# Altium footprint library SamacSys.PcbLib: 1008 footprints (part 55 of 63)
Each footprint in its own frame and in the unit in brackets; x right, y up, seen from the top. Pads: shape width x height; smd on the part's side, far side on the other; paste and mask are expansions set on the pad; w line width, h text height; cw(c..) or ccw(c..) is an arc to the next point about the centre after c.
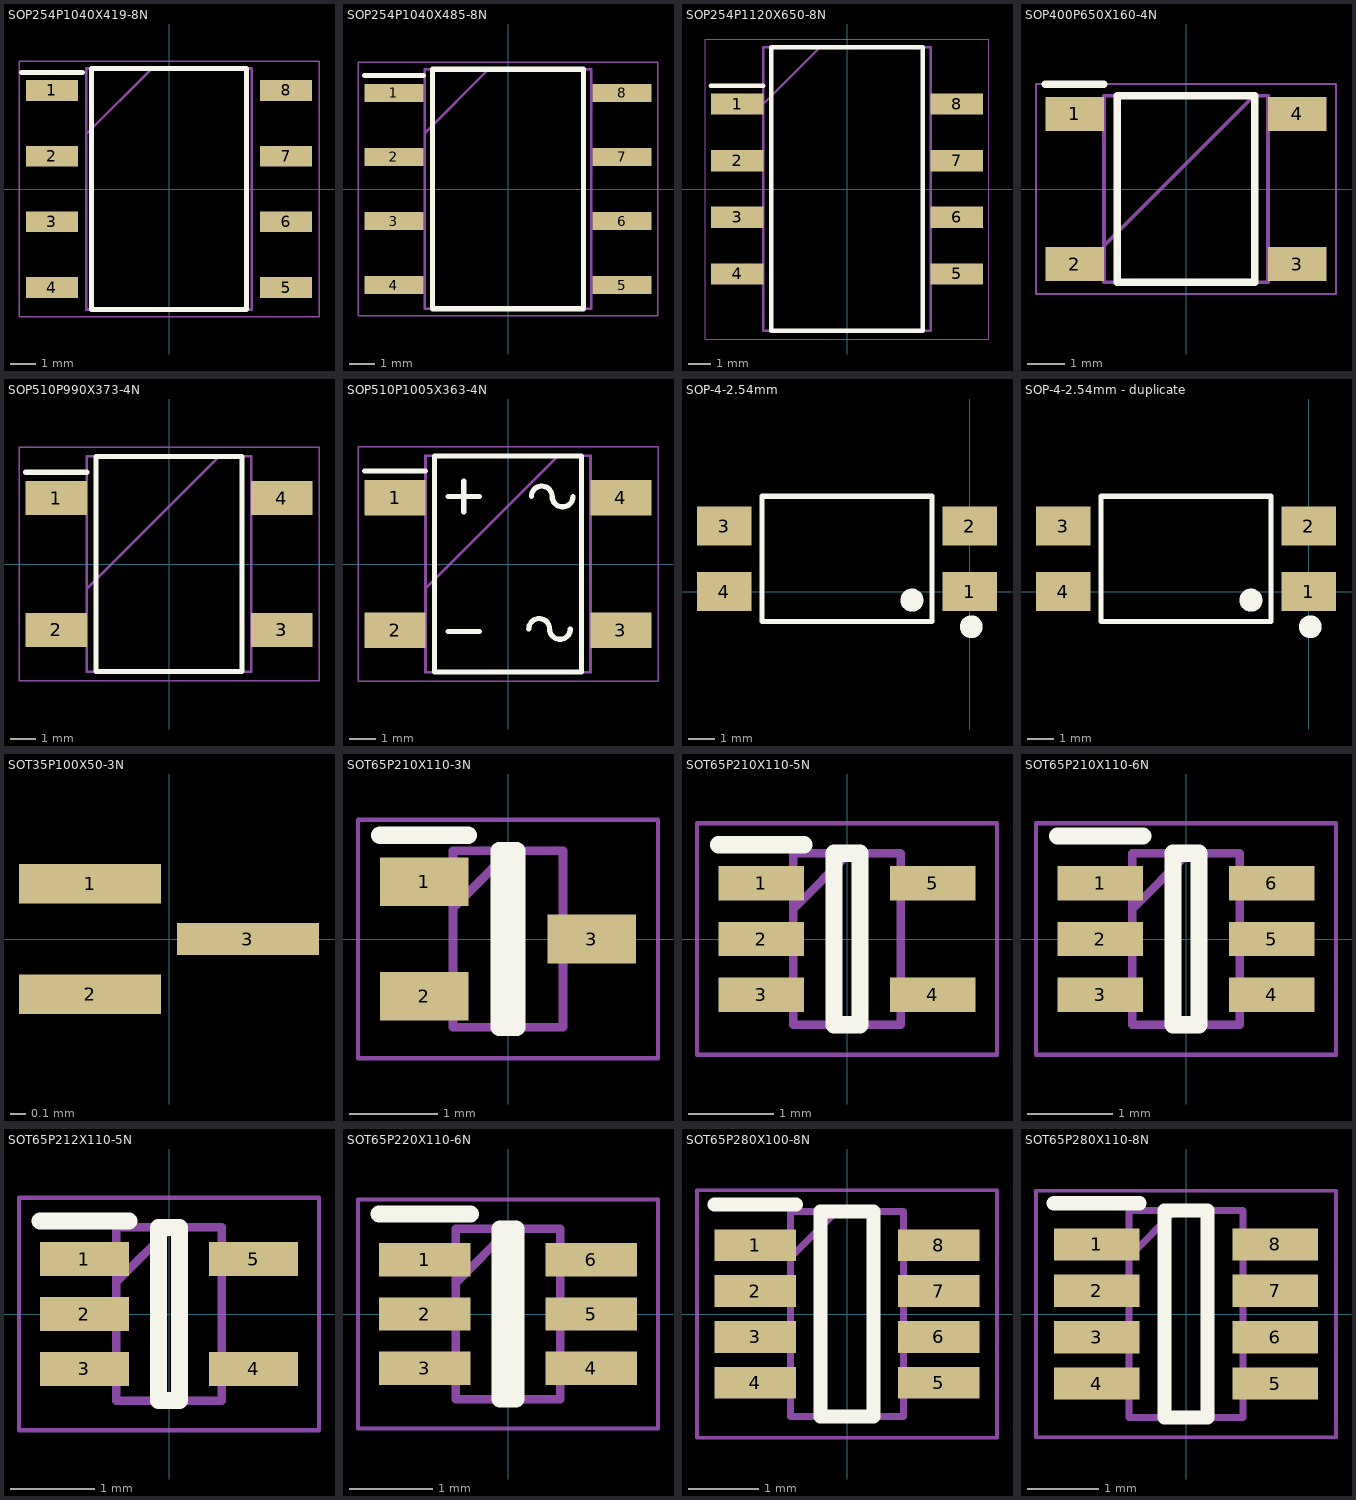
[diagram p54: the footprints below, top view; thin cyan lines are the x and y axes]

## SOP254P1040X419-8N [mm]
pads (8):
  rect 2x0.8 smd: 1(-4.525,3.81) 2(-4.525,1.27) 3(-4.525,-1.27) 4(-4.525,-3.81) 5(4.525,-3.81) 6(4.525,-1.27) 7(4.525,1.27) 8(4.525,3.81)
Top Overlay:
  lines w0.2: -5.7,4.51 -3.35,4.51 ; -3,-4.66 -3,4.66 3,4.66 3,-4.66 -3,-4.66
Assembly:
  lines w0.1: -3.2,2.12 -0.66,4.66 ; -3.2,-4.66 -3.2,4.66 3.2,4.66 3.2,-4.66 -3.2,-4.66
Countryard:
  lines w0.05: -5.8,-4.935 -5.8,4.935 5.8,4.935 5.8,-4.935 -5.8,-4.935
3D body "NSi1050-DDBR.stp": height 4.19, standoff 0, extent -5.2,-4.66 5.2,4.66

## SOP254P1040X485-8N [mm]
pads (8):
  rect 2.35x0.7 smd: 1(-4.525,3.81) 2(-4.525,1.27) 3(-4.525,-1.27) 4(-4.525,-3.81) 5(4.525,-3.81) 6(4.525,-1.27) 7(4.525,1.27) 8(4.525,3.81)
Top Overlay:
  lines w0.2: -5.7,4.51 -3.35,4.51 ; -3,-4.75 -3,4.75 3,4.75 3,-4.75 -3,-4.75
Assembly:
  lines w0.1: -3.31,2.21 -0.77,4.75 ; -3.31,-4.75 -3.31,4.75 3.31,4.75 3.31,-4.75 -3.31,-4.75
Countryard:
  lines w0.05: -5.95,-5.025 -5.95,5.025 5.95,5.025 5.95,-5.025 -5.95,-5.025
3D body "ISO1050DUB.stp": height 3.68, standoff 0, extent -5.21,-4.575 5.21,4.575

## SOP254P1120X650-8N [mm]
pads (8):
  rect 2.35x0.95 smd: 1(-4.925,3.81) 2(-4.925,1.27) 3(-4.925,-1.27) 4(-4.925,-3.81) 5(4.925,-3.81) 6(4.925,-1.27) 7(4.925,1.27) 8(4.925,3.81)
Top Overlay:
  lines w0.2: -6.1,4.635 -3.75,4.635 ; -3.4,-6.35 3.4,-6.35 3.4,6.35 -3.4,6.35 -3.4,-6.35
Assembly:
  lines w0.1: -3.75,3.81 -1.21,6.35 ; -3.75,-6.35 3.75,-6.35 3.75,6.35 -3.75,6.35 -3.75,-6.35
Countryard:
  lines w0.05: -6.35,-6.725 6.35,-6.725 6.35,6.725 -6.35,6.725 -6.35,-6.725
3D body "AM1L-0505S-NZ.stp": height 6.5, standoff 0, extent -5.6,-6.35 5.6,6.35

## SOP400P650X160-4N [mm]
pads (4):
  rect 1.562x0.9 smd: 1(-2.969,2) 2(-2.969,-2) 3(2.969,-2) 4(2.969,2)
Top Overlay:
  lines w0.2: -3.75,2.8 -2.188,2.8 ; -1.838,-2.488 1.838,-2.488 1.838,2.488 -1.838,2.488 -1.838,-2.488
Assembly:
  lines w0.1: -2.188,-1.512 1.812,2.488 ; -2.188,-2.488 2.188,-2.488 2.188,2.488 -2.188,2.488 -2.188,-2.488
Countryard:
  lines w0.05: -4,-2.8 4,-2.8 4,2.8 -4,2.8 -4,-2.8
3D body "MDB10SV.stp": height 1.6, standoff 0, extent -3.25,-2.488 3.25,2.488

## SOP510P990X373-4N [mm]
pads (4):
  rect 2.375x1.3 smd: 1(-4.362,2.55) 2(-4.362,-2.55) 3(4.362,-2.55) 4(4.362,2.55)
Top Overlay:
  lines w0.2: -5.55,3.55 -3.175,3.55 ; -2.825,-4.16 2.825,-4.16 2.825,4.16 -2.825,4.16 -2.825,-4.16
Assembly:
  lines w0.1: -3.175,-0.94 1.925,4.16 ; -3.175,-4.16 3.175,-4.16 3.175,4.16 -3.175,4.16 -3.175,-4.16
Countryard:
  lines w0.05: -5.8,-4.505 5.8,-4.505 5.8,4.505 -5.8,4.505 -5.8,-4.505
3D body "DB157S.stp": height 3.73, standoff 0, extent -4.95,-4.16 4.95,4.16

## SOP510P1005X363-4N [mm]
pads (4):
  rect 2.35x1.35 smd: 1(-4.35,2.55) 2(-4.35,-2.55) 3(4.35,-2.55) 4(4.35,2.55)
Top Overlay:
  lines w0.2: -5.525,3.575 -3.175,3.575 ; -2.3,-2.6 -1.1,-2.6 ; -2.3,2.6 -1.1,2.6 ; -1.7,2 -1.7,3.2 ; 0.8,-2.5 cw(c1.2,-2.5) 1.6,-2.5 ccw(c2,-2.5) 2.4,-2.5 ; 0.9,2.6 cw(c1.3,2.6) 1.7,2.6 ccw(c2.1,2.6) 2.5,2.6 ; -2.825,-4.16 2.825,-4.16 2.825,4.16 -2.825,4.16 -2.825,-4.16
Assembly:
  lines w0.1: -3.175,-0.94 1.925,4.16 ; -3.175,-4.16 3.175,-4.16 3.175,4.16 -3.175,4.16 -3.175,-4.16
Countryard:
  lines w0.05: -5.775,-4.505 5.775,-4.505 5.775,4.505 -5.775,4.505 -5.775,-4.505
3D body "DF01SA-E3_45.stp": height 3.63, standoff 0, extent -5.025,-4.16 5.025,4.16

## SOP-4-2.54mm [mm]
pads (4):
  rect 2.1x1.5 smd: 1(0,0) 2(0,2.525) 3(-9.45,2.525) 4(-9.45,0)
Top Overlay:
  circle w0.5: c0.06,-1.35 r0.19
  circle w0.5: c-2.225,-0.325 r0.195
  lines w0.2: -8,0.925 -8,3.675 -1.45,3.675 -1.45,-1.15 -8,-1.15 -8,1.075

## SOP-4-2.54mm - duplicate [mm]
pads (4):
  rect 2.1x1.5 smd: 1(0,0) 2(0,2.525) 3(-9.45,2.525) 4(-9.45,0)
Top Overlay:
  circle w0.5: c-2.225,-0.325 r0.195
  circle w0.5: c0.06,-1.35 r0.19
  lines w0.2: -8,0.925 -8,3.675 -1.45,3.675 -1.45,-1.15 -8,-1.15 -8,1.075

## SOT35P100X50-3N [mil]
pads (3):
  rect 36x10 smd: 1(-20,14) 2(-20,-14)
  rect 36x8 smd: 3(20,0)
3D body "TPD2EUSB30ADRTR.stp": height 19.49, standoff 0, extent -19.68,-19.68 19.68,19.68

## SOT65P210X110-3N [mm]
pads (3):
  rect 1x0.55 smd: 1(-0.95,0.65) 2(-0.95,-0.65) 3(0.95,0)
Top Overlay:
  lines w0.2: -1.45,1.175 -0.45,1.175 ; -0.1,-1 0.1,-1 0.1,1 -0.1,1 -0.1,-1
Assembly:
  lines w0.1: -0.625,0.35 0.025,1 ; -0.625,-1 0.625,-1 0.625,1 -0.625,1 -0.625,-1
Countryard:
  lines w0.05: -1.7,-1.35 1.7,-1.35 1.7,1.35 -1.7,1.35 -1.7,-1.35
3D body "BAS40W.stp": height 0.95, standoff 0, extent -1.052,-1.049 1.048,1.051

## SOT65P210X110-5N [mm]
pads (5):
  rect 1x0.4 smd: 1(-1,0.65) 2(-1,0) 3(-1,-0.65) 4(1,-0.65) 5(1,0.65)
Top Overlay:
  lines w0.2: -1.5,1.1 -0.5,1.1 ; -0.15,-1 -0.15,1 0.15,1 0.15,-1 -0.15,-1
Assembly:
  lines w0.1: -0.625,0.35 0.025,1 ; -0.625,-1 -0.625,1 0.625,1 0.625,-1 -0.625,-1
Countryard:
  lines w0.05: -1.75,-1.35 -1.75,1.35 1.75,1.35 1.75,-1.35 -1.75,-1.35
3D body "74LVC1G07SE-7.stp": height 1.1, standoff 0, extent -1.05,-1 1.05,1

## SOT65P210X110-6N [mm]
pads (6):
  rect 1x0.4 smd: 1(-1,0.65) 2(-1,0) 3(-1,-0.65) 4(1,-0.65) 5(1,0) 6(1,0.65)
Top Overlay:
  lines w0.2: -1.5,1.2 -0.5,1.2 ; -0.15,-1 -0.15,1 0.15,1 0.15,-1 -0.15,-1
Assembly:
  lines w0.1: -0.625,0.35 0.025,1 ; -0.625,-1 -0.625,1 0.625,1 0.625,-1 -0.625,-1
Countryard:
  lines w0.05: -1.75,-1.35 -1.75,1.35 1.75,1.35 1.75,-1.35 -1.75,-1.35
3D body "BSS138DWQ-7.stp": height 1.1, standoff 0, extent -1.05,-1 1.05,1

## SOT65P212X110-5N [mm]
pads (5):
  rect 1.05x0.4 smd: 1(-1,0.65) 2(-1,0) 3(-1,-0.65) 4(1,-0.65) 5(1,0.65)
Top Overlay:
  lines w0.2: -1.525,1.1 -0.475,1.1 ; -0.125,-1.025 0.125,-1.025 0.125,1.025 -0.125,1.025 -0.125,-1.025
Assembly:
  lines w0.1: -0.625,0.375 0.025,1.025 ; -0.625,-1.025 0.625,-1.025 0.625,1.025 -0.625,1.025 -0.625,-1.025
Countryard:
  lines w0.05: -1.775,-1.375 1.775,-1.375 1.775,1.375 -1.775,1.375 -1.775,-1.375
3D body "74LVC1G04GW.stp": height 1.1, standoff 0, extent -1.062,-1.025 1.062,1.025

## SOT65P220X110-6N [mm]
pads (6):
  rect 1.1x0.4 smd: 1(-1,0.65) 2(-1,0) 3(-1,-0.65) 4(1,-0.65) 5(1,0) 6(1,0.65)
Top Overlay:
  lines w0.2: -1.55,1.2 -0.45,1.2 ; -0.1,-1.025 -0.1,1.025 0.1,1.025 0.1,-1.025 -0.1,-1.025
Assembly:
  lines w0.1: -0.625,0.375 0.025,1.025 ; -0.625,-1.025 -0.625,1.025 0.625,1.025 0.625,-1.025 -0.625,-1.025
Countryard:
  lines w0.05: -1.8,-1.375 -1.8,1.375 1.8,1.375 1.8,-1.375 -1.8,-1.375
3D body "SP3002-04JTG.stp": height 1.1, standoff 0, extent -1.1,-1.025 1.1,1.025

## SOT65P280X100-8N [mm]
pads (8):
  rect 1.15x0.45 smd: 1(-1.3,0.975) 2(-1.3,0.325) 3(-1.3,-0.325) 4(-1.3,-0.975) 5(1.3,-0.975) 6(1.3,-0.325) 7(1.3,0.325) 8(1.3,0.975)
Top Overlay:
  lines w0.2: -1.875,1.55 -0.725,1.55 ; -0.375,-1.45 -0.375,1.45 0.375,1.45 0.375,-1.45 -0.375,-1.45
Assembly:
  lines w0.1: -0.8,0.8 -0.15,1.45 ; -0.8,-1.45 -0.8,1.45 0.8,1.45 0.8,-1.45 -0.8,-1.45
Countryard:
  lines w0.05: -2.125,-1.75 -2.125,1.75 2.125,1.75 2.125,-1.75 -2.125,-1.75
3D body "MP5034GJ-P.stp": height 1, standoff 0, extent -1.4,-1.45 1.4,1.45

## SOT65P280X110-8N [mm]
pads (8):
  rect 1.2x0.45 smd: 1(-1.25,0.975) 2(-1.25,0.325) 3(-1.25,-0.325) 4(-1.25,-0.975) 5(1.25,-0.975) 6(1.25,-0.325) 7(1.25,0.325) 8(1.25,0.975)
Top Overlay:
  lines w0.2: -1.85,1.55 -0.65,1.55 ; -0.3,-1.45 -0.3,1.45 0.3,1.45 0.3,-1.45 -0.3,-1.45
Assembly:
  lines w0.1: -0.8,0.8 -0.15,1.45 ; -0.8,-1.45 -0.8,1.45 0.8,1.45 0.8,-1.45 -0.8,-1.45
Countryard:
  lines w0.05: -2.1,-1.725 -2.1,1.725 2.1,1.725 2.1,-1.725 -2.1,-1.725
3D body "INA241A1___SOT-23_TYPE_.stp": height 0.9, standoff 0, extent -1.41,-1.45 1.41,1.45